# Altium footprint library WR-TBL_Pluggable Connector_5.08mm.PcbLib: 295 footprints (part 3 of 19)
Each footprint in its own frame and in the unit in brackets; x right, y up, seen from the top. Pads: shape width x height; smd on the part's side, far side on the other; paste and mask are expansions set on the pad; w line width, h text height; cw(c..) or ccw(c..) is an arc to the next point about the centre after c.
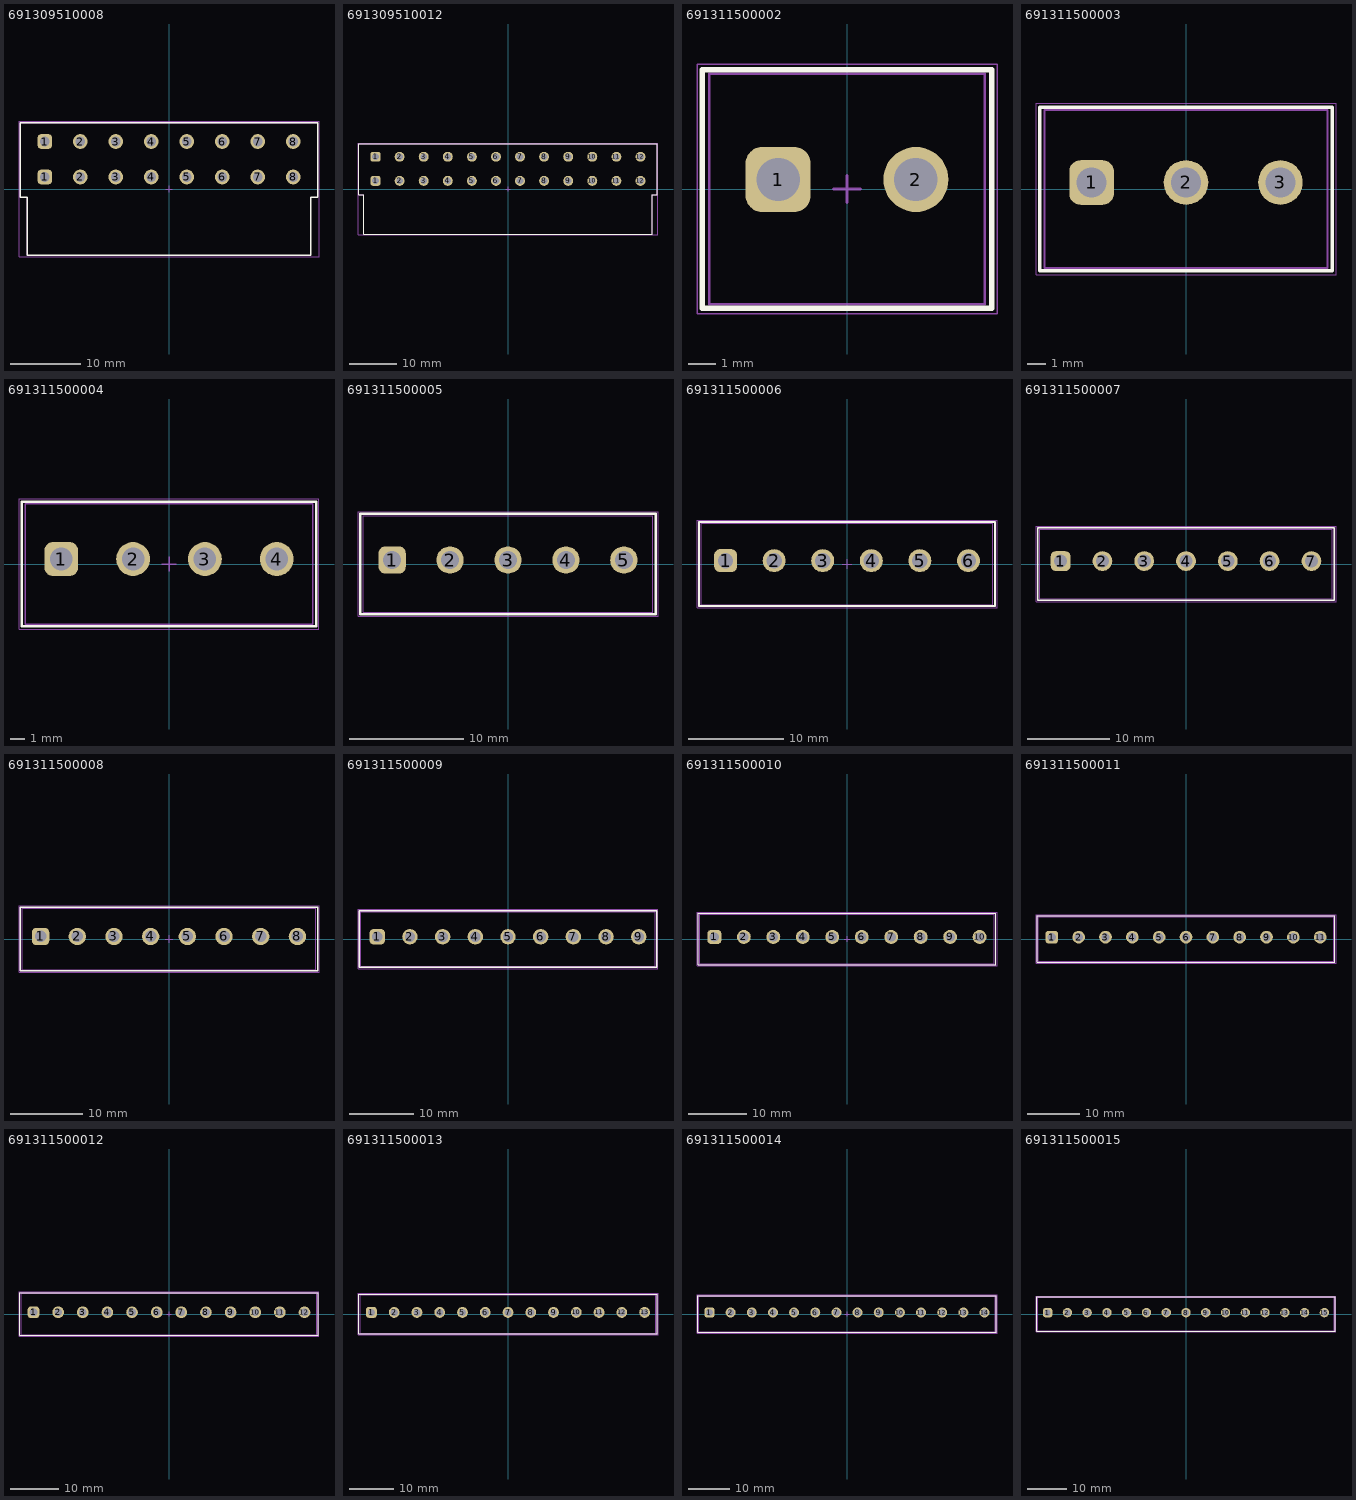
[diagram p2: the footprints below, top view; thin cyan lines are the x and y axes]

## 691309510008 [mm] "5.08 mm Reversed Gender Horizontal PCB Header - 08p"
height 8.6
pads (16):
  rrect50% 2.1x2.1 hole 1.4: 1(-17.78,1.72) 1(-17.78,6.8)
  round 2.1 hole 1.4: 2(-12.7,1.72) 2(-12.7,6.8) 3(-7.62,1.72) 3(-7.62,6.8) 4(-2.54,1.72) 4(-2.54,6.8) 5(2.54,1.72) 5(2.54,6.8) 6(7.62,1.72) 6(7.62,6.8) 7(12.7,1.72) 7(12.7,6.8) 8(17.78,1.72) 8(17.78,6.8)
Top Overlay:
  lines w0.2: -21.28,-1.2 -20.28,-1.2 -20.28,-9.5 20.28,-9.5 20.28,-1.2 21.28,-1.2 21.28,9.5 -21.28,9.5 -21.28,-1.2
Top Assembly:
  lines w0.1: -21.28,-1.2 -21.28,9.5 21.28,9.5 21.28,-1.2 20.28,-1.2 20.28,-9.5 -20.28,-9.5 -20.28,-1.2 -21.28,-1.2
Top Designator:
  text ".Designator" at -3.647,-0.357 h1
Top 3D Body:
  lines w0.1: -21.28,-1.2 -20.28,-1.2 -20.28,-9.5 20.28,-9.5 20.28,-1.2 21.28,-1.2 21.28,9.5 -21.28,9.5 -21.28,-1.2
Top Courtyard:
  lines w0.05: -21.48,-9.7 21.48,-9.7 21.48,9.7 -21.48,9.7 -21.48,-9.7
Top Component Center:
  lines w0.1: -0.5,0 0.5,0 ; 0,-0.5 0,0.5
3D body "691309510008.stp": height 10.94, standoff -3.55, extent -21.28,-9.5 21.28,9.5

## 691309510012 [mm] "5.08 mm Reversed Gender Horizontal PCB Header - 12p"
height 8.6
pads (24):
  rrect50% 2.1x2.1 hole 1.4: 1(-27.94,1.72) 1(-27.94,6.8)
  round 2.1 hole 1.4: 2(-22.86,1.72) 2(-22.86,6.8) 3(-17.78,1.72) 3(-17.78,6.8) 4(-12.7,1.72) 4(-12.7,6.8) 5(-7.62,1.72) 5(-7.62,6.8) 6(-2.54,1.72) 6(-2.54,6.8) 7(2.54,1.72) 7(2.54,6.8) 8(7.62,1.72) 8(7.62,6.8) 9(12.7,1.72) 9(12.7,6.8) 10(17.78,1.72) 10(17.78,6.8) 11(22.86,1.72) 11(22.86,6.8) 12(27.94,1.72) 12(27.94,6.8)
Top Overlay:
  lines w0.2: -31.44,-1.2 -31.44,9.5 31.44,9.5 31.44,-1.2 30.44,-1.2 30.44,-9.5 -30.44,-9.5 -30.44,-1.2 -31.44,-1.2
Top Assembly:
  lines w0.1: -31.44,-1.2 -30.44,-1.2 -30.44,-9.5 30.44,-9.5 30.44,-1.2 31.44,-1.2 31.44,9.5 -31.44,9.5 -31.44,-1.2
Top Designator:
  text ".Designator" at -3.647,-0.357 h1
Top 3D Body:
  lines w0.1: -31.44,-1.2 -31.44,9.5 31.44,9.5 31.44,-1.2 30.44,-1.2 30.44,-9.5 -30.44,-9.5 -30.44,-1.2 -31.44,-1.2
Top Courtyard:
  lines w0.05: -31.64,-9.7 -31.64,9.7 31.64,9.7 31.64,-9.7 -31.64,-9.7
Top Component Center:
  lines w0.1: -0.5,0 0.5,0 ; 0,-0.5 0,0.5
3D body "691309510012.stp": height 10.94, standoff -3.55, extent -31.44,-9.5 31.44,9.5

## 691311500002 [mm] "5,08mm - PCB Headers - Vertical - Opened ends -02p"
height 12
pads (2):
  rrect50% 2.4x2.4 hole 1.6: 1(-2.54,0.35)
  round 2.4 hole 1.6: 2(2.54,0.35)
Top Overlay:
  lines w0.2: -5.33,-4.4 -5.33,4.4 5.33,4.4 5.33,-4.4 -5.33,-4.4
Top Assembly:
  lines w0.1: -5.33,-4.4 5.33,-4.4 5.33,4.4 -5.33,4.4 -5.33,-4.4
Top Designator:
  text ".Designator" at -3.647,-0.357 h1
Top 3D Body:
  lines w0.1: -5.08,-4.25 -5.08,4.25 5.08,4.25 5.08,-4.25 -5.08,-4.25
Top Courtyard:
  lines w0.05: -5.53,-4.6 -5.53,4.6 5.53,4.6 5.53,-4.6 -5.53,-4.6
Top Component Center:
  lines w0.1: -0.5,0 0.5,0 ; 0,-0.5 0,0.5
3D body "691311500002.stp": height 12.05, standoff -3.95, extent -5.08,-4.25 5.08,4.25

## 691311500003 [mm] "5,08mm - PCB Headers - Vertical - Opened ends -03p"
height 12
pads (3):
  rrect50% 2.4x2.4 hole 1.6: 1(-5.08,0.35)
  round 2.4 hole 1.6: 2(0,0.35) 3(5.08,0.35)
Top Overlay:
  lines w0.2: -7.87,-4.4 -7.87,4.4 7.87,4.4 7.87,-4.4 -7.87,-4.4
Top Assembly:
  lines w0.1: -7.87,-4.4 7.87,-4.4 7.87,4.4 -7.87,4.4 -7.87,-4.4
Top Designator:
  text ".Designator" at -3.647,-0.357 h1
Top 3D Body:
  lines w0.1: -7.62,-4.25 -7.62,4.25 7.62,4.25 7.62,-4.25 -7.62,-4.25
Top Courtyard:
  lines w0.05: -8.07,-4.6 -8.07,4.6 8.07,4.6 8.07,-4.6 -8.07,-4.6
Top Component Center:
  lines w0.1: -0.5,0 0.5,0 ; 0,-0.5 0,0.5
3D body "691311500003.stp": height 12.05, standoff -3.95, extent -7.62,-4.25 7.62,4.25

## 691311500004 [mm] "5,08mm - PCB Headers - Vertical - Opened ends -04p"
height 12
pads (4):
  rrect50% 2.4x2.4 hole 1.6: 1(-7.62,0.35)
  round 2.4 hole 1.6: 2(-2.54,0.35) 3(2.54,0.35) 4(7.62,0.35)
Top Overlay:
  lines w0.2: -10.41,-4.4 10.41,-4.4 10.41,4.4 -10.41,4.4 -10.41,-4.4
Top Assembly:
  lines w0.1: -10.41,-4.4 -10.41,4.4 10.41,4.4 10.41,-4.4 -10.41,-4.4
Top Designator:
  text ".Designator" at -3.647,-0.357 h1
Top 3D Body:
  lines w0.1: -10.16,-4.25 10.16,-4.25 10.16,4.25 -10.16,4.25 -10.16,-4.25
Top Courtyard:
  lines w0.05: -10.61,-4.6 10.61,-4.6 10.61,4.6 -10.61,4.6 -10.61,-4.6
Top Component Center:
  lines w0.1: -0.5,0 0.5,0 ; 0,-0.5 0,0.5
3D body "691311500004.stp": height 12.05, standoff -3.95, extent -10.16,-4.25 10.16,4.25

## 691311500005 [mm] "5,08mm - PCB Headers - Vertical - Opened ends -05p"
height 12
pads (5):
  rrect50% 2.4x2.4 hole 1.6: 1(-10.16,0.35)
  round 2.4 hole 1.6: 2(-5.08,0.35) 3(0,0.35) 4(5.08,0.35) 5(10.16,0.35)
Top Overlay:
  lines w0.2: -12.95,-4.4 12.95,-4.4 12.95,4.4 -12.95,4.4 -12.95,-4.4
Top Assembly:
  lines w0.1: -12.95,-4.4 -12.95,4.4 12.95,4.4 12.95,-4.4 -12.95,-4.4
Top Designator:
  text ".Designator" at -3.647,-0.357 h1
Top 3D Body:
  lines w0.1: -12.7,-4.25 12.7,-4.25 12.7,4.25 -12.7,4.25 -12.7,-4.25
Top Courtyard:
  lines w0.05: -13.15,-4.6 13.15,-4.6 13.15,4.6 -13.15,4.6 -13.15,-4.6
Top Component Center:
  lines w0.1: -0.5,0 0.5,0 ; 0,-0.5 0,0.5
3D body "691311500005.stp": height 12.05, standoff -3.95, extent -12.7,-4.25 12.7,4.25

## 691311500006 [mm] "5,08mm - PCB Headers - Vertical - Opened ends -06p"
height 12
pads (6):
  rrect50% 2.4x2.4 hole 1.6: 1(-12.7,0.35)
  round 2.4 hole 1.6: 2(-7.62,0.35) 3(-2.54,0.35) 4(2.54,0.35) 5(7.62,0.35) 6(12.7,0.35)
Top Overlay:
  lines w0.2: -15.49,-4.4 15.49,-4.4 15.49,4.4 -15.49,4.4 -15.49,-4.4
Top Assembly:
  lines w0.1: -15.49,-4.4 -15.49,4.4 15.49,4.4 15.49,-4.4 -15.49,-4.4
Top Designator:
  text ".Designator" at -3.647,-0.357 h1
Top 3D Body:
  lines w0.1: -15.24,-4.25 15.24,-4.25 15.24,4.25 -15.24,4.25 -15.24,-4.25
Top Courtyard:
  lines w0.05: -15.69,-4.6 15.69,-4.6 15.69,4.6 -15.69,4.6 -15.69,-4.6
Top Component Center:
  lines w0.1: -0.5,0 0.5,0 ; 0,-0.5 0,0.5
3D body "691311500006.stp": height 12.05, standoff -3.95, extent -15.24,-4.25 15.24,4.25

## 691311500007 [mm] "5,08mm - PCB Headers - Vertical - Opened ends -07p"
height 12
pads (7):
  rrect50% 2.4x2.4 hole 1.6: 1(-15.24,0.35)
  round 2.4 hole 1.6: 2(-10.16,0.35) 3(-5.08,0.35) 4(0,0.35) 5(5.08,0.35) 6(10.16,0.35) 7(15.24,0.35)
Top Overlay:
  lines w0.2: -18.03,-4.4 18.03,-4.4 18.03,4.4 -18.03,4.4 -18.03,-4.4
Top Assembly:
  lines w0.1: -18.03,-4.4 -18.03,4.4 18.03,4.4 18.03,-4.4 -18.03,-4.4
Top Designator:
  text ".Designator" at -3.647,-0.357 h1
Top 3D Body:
  lines w0.1: -17.78,-4.25 17.78,-4.25 17.78,4.25 -17.78,4.25 -17.78,-4.25
Top Courtyard:
  lines w0.05: -18.23,-4.6 18.23,-4.6 18.23,4.6 -18.23,4.6 -18.23,-4.6
Top Component Center:
  lines w0.1: -0.5,0 0.5,0 ; 0,-0.5 0,0.5
3D body "691311500007.stp": height 12.05, standoff -3.95, extent -17.78,-4.25 17.78,4.25

## 691311500008 [mm] "5,08mm - PCB Headers - Vertical - Opened ends -08p"
height 12
pads (8):
  rrect50% 2.4x2.4 hole 1.6: 1(-17.78,0.35)
  round 2.4 hole 1.6: 2(-12.7,0.35) 3(-7.62,0.35) 4(-2.54,0.35) 5(2.54,0.35) 6(7.62,0.35) 7(12.7,0.35) 8(17.78,0.35)
Top Overlay:
  lines w0.2: -20.57,-4.4 20.57,-4.4 20.57,4.4 -20.57,4.4 -20.57,-4.4
Top Assembly:
  lines w0.1: -20.57,-4.4 -20.57,4.4 20.57,4.4 20.57,-4.4 -20.57,-4.4
Top Designator:
  text ".Designator" at -3.647,-0.357 h1
Top 3D Body:
  lines w0.1: -20.32,-4.25 20.32,-4.25 20.32,4.25 -20.32,4.25 -20.32,-4.25
Top Courtyard:
  lines w0.05: -20.77,-4.6 20.77,-4.6 20.77,4.6 -20.77,4.6 -20.77,-4.6
Top Component Center:
  lines w0.1: -0.5,0 0.5,0 ; 0,-0.5 0,0.5
3D body "691311500008.stp": height 12.05, standoff -3.95, extent -20.32,-4.25 20.32,4.25

## 691311500009 [mm] "5,08mm - PCB Headers - Vertical - Opened ends -09p"
height 12
pads (9):
  rrect50% 2.4x2.4 hole 1.6: 1(-20.32,0.35)
  round 2.4 hole 1.6: 2(-15.24,0.35) 3(-10.16,0.35) 4(-5.08,0.35) 5(0,0.35) 6(5.08,0.35) 7(10.16,0.35) 8(15.24,0.35) 9(20.32,0.35)
Top Overlay:
  lines w0.2: -23.11,-4.4 23.11,-4.4 23.11,4.4 -23.11,4.4 -23.11,-4.4
Top Assembly:
  lines w0.1: -23.11,-4.4 -23.11,4.4 23.11,4.4 23.11,-4.4 -23.11,-4.4
Top Designator:
  text ".Designator" at -3.647,-0.357 h1
Top 3D Body:
  lines w0.1: -22.86,-4.25 22.86,-4.25 22.86,4.25 -22.86,4.25 -22.86,-4.25
Top Courtyard:
  lines w0.05: -23.31,-4.6 23.31,-4.6 23.31,4.6 -23.31,4.6 -23.31,-4.6
Top Component Center:
  lines w0.1: -0.5,0 0.5,0 ; 0,-0.5 0,0.5
3D body "691311500009.stp": height 12.05, standoff -3.95, extent -22.86,-4.25 22.86,4.25

## 691311500010 [mm] "5,08mm - PCB Headers - Vertical - Opened ends -10p"
height 12
pads (10):
  rrect50% 2.4x2.4 hole 1.6: 1(-22.86,0.35)
  round 2.4 hole 1.6: 2(-17.78,0.35) 3(-12.7,0.35) 4(-7.62,0.35) 5(-2.54,0.35) 6(2.54,0.35) 7(7.62,0.35) 8(12.7,0.35) 9(17.78,0.35) 10(22.86,0.35)
Top Overlay:
  lines w0.2: -25.65,-4.4 25.65,-4.4 25.65,4.4 -25.65,4.4 -25.65,-4.4
Top Assembly:
  lines w0.1: -25.65,-4.4 -25.65,4.4 25.65,4.4 25.65,-4.4 -25.65,-4.4
Top Designator:
  text ".Designator" at -3.647,-0.357 h1
Top 3D Body:
  lines w0.1: -25.4,-4.25 25.4,-4.25 25.4,4.25 -25.4,4.25 -25.4,-4.25
Top Courtyard:
  lines w0.05: -25.85,-4.6 25.85,-4.6 25.85,4.6 -25.85,4.6 -25.85,-4.6
Top Component Center:
  lines w0.1: -0.5,0 0.5,0 ; 0,-0.5 0,0.5
3D body "691311500010.stp": height 12.05, standoff -3.95, extent -25.4,-4.25 25.4,4.25

## 691311500011 [mm] "5,08mm - PCB Headers - Vertical - Opened ends -11p"
height 12
pads (11):
  rrect50% 2.4x2.4 hole 1.6: 1(-25.4,0.35)
  round 2.4 hole 1.6: 2(-20.32,0.35) 3(-15.24,0.35) 4(-10.16,0.35) 5(-5.08,0.35) 6(0,0.35) 7(5.08,0.35) 8(10.16,0.35) 9(15.24,0.35) 10(20.32,0.35) 11(25.4,0.35)
Top Overlay:
  lines w0.2: -28.19,-4.4 28.19,-4.4 28.19,4.4 -28.19,4.4 -28.19,-4.4
Top Assembly:
  lines w0.1: -28.19,-4.4 -28.19,4.4 28.19,4.4 28.19,-4.4 -28.19,-4.4
Top Designator:
  text ".Designator" at -3.647,-0.357 h1
Top 3D Body:
  lines w0.1: -27.94,-4.25 27.94,-4.25 27.94,4.25 -27.94,4.25 -27.94,-4.25
Top Courtyard:
  lines w0.05: -28.39,-4.6 28.39,-4.6 28.39,4.6 -28.39,4.6 -28.39,-4.6
Top Component Center:
  lines w0.1: -0.5,0 0.5,0 ; 0,-0.5 0,0.5
3D body "691311500011.stp": height 12.05, standoff -3.95, extent -27.94,-4.25 27.94,4.25

## 691311500012 [mm] "5,08mm - PCB Headers - Vertical - Opened ends -12p"
height 12
pads (12):
  rrect50% 2.4x2.4 hole 1.6: 1(-27.94,0.35)
  round 2.4 hole 1.6: 2(-22.86,0.35) 3(-17.78,0.35) 4(-12.7,0.35) 5(-7.62,0.35) 6(-2.54,0.35) 7(2.54,0.35) 8(7.62,0.35) 9(12.7,0.35) 10(17.78,0.35) 11(22.86,0.35) 12(27.94,0.35)
Top Overlay:
  lines w0.2: -30.73,-4.4 30.73,-4.4 30.73,4.4 -30.73,4.4 -30.73,-4.4
Top Assembly:
  lines w0.1: -30.73,-4.4 -30.73,4.4 30.73,4.4 30.73,-4.4 -30.73,-4.4
Top Designator:
  text ".Designator" at -3.647,-0.357 h1
Top 3D Body:
  lines w0.1: -30.48,-4.25 30.48,-4.25 30.48,4.25 -30.48,4.25 -30.48,-4.25
Top Courtyard:
  lines w0.05: -30.93,-4.6 30.93,-4.6 30.93,4.6 -30.93,4.6 -30.93,-4.6
Top Component Center:
  lines w0.1: -0.5,0 0.5,0 ; 0,-0.5 0,0.5
3D body "691311500012.stp": height 12.05, standoff -3.95, extent -30.48,-4.25 30.48,4.25

## 691311500013 [mm] "5,08mm - PCB Headers - Vertical - Opened ends -13p"
height 12
pads (13):
  rrect50% 2.4x2.4 hole 1.6: 1(-30.48,0.35)
  round 2.4 hole 1.6: 2(-25.4,0.35) 3(-20.32,0.35) 4(-15.24,0.35) 5(-10.16,0.35) 6(-5.08,0.35) 7(0,0.35) 8(5.08,0.35) 9(10.16,0.35) 10(15.24,0.35) 11(20.32,0.35) 12(25.4,0.35) 13(30.48,0.35)
Top Overlay:
  lines w0.2: -33.27,-4.4 33.27,-4.4 33.27,4.4 -33.27,4.4 -33.27,-4.4
Top Assembly:
  lines w0.1: -33.27,-4.4 -33.27,4.4 33.27,4.4 33.27,-4.4 -33.27,-4.4
Top Designator:
  text ".Designator" at -3.647,-0.357 h1
Top 3D Body:
  lines w0.1: -33.02,-4.25 33.02,-4.25 33.02,4.25 -33.02,4.25 -33.02,-4.25
Top Courtyard:
  lines w0.05: -33.47,-4.6 33.47,-4.6 33.47,4.6 -33.47,4.6 -33.47,-4.6
Top Component Center:
  lines w0.1: -0.5,0 0.5,0 ; 0,-0.5 0,0.5
3D body "691311500013.stp": height 12.05, standoff -3.95, extent -33.02,-4.25 33.02,4.25

## 691311500014 [mm] "5,08mm - PCB Headers - Vertical - Opened ends -14p"
height 12
pads (14):
  rrect50% 2.4x2.4 hole 1.6: 1(-33.02,0.35)
  round 2.4 hole 1.6: 2(-27.94,0.35) 3(-22.86,0.35) 4(-17.78,0.35) 5(-12.7,0.35) 6(-7.62,0.35) 7(-2.54,0.35) 8(2.54,0.35) 9(7.62,0.35) 10(12.7,0.35) 11(17.78,0.35) 12(22.86,0.35) 13(27.94,0.35) 14(33.02,0.35)
Top Overlay:
  lines w0.2: -35.81,-4.4 35.81,-4.4 35.81,4.4 -35.81,4.4 -35.81,-4.4
Top Assembly:
  lines w0.1: -35.81,-4.4 -35.81,4.4 35.81,4.4 35.81,-4.4 -35.81,-4.4
Top Designator:
  text ".Designator" at -3.647,-0.357 h1
Top 3D Body:
  lines w0.1: -35.56,-4.25 35.56,-4.25 35.56,4.25 -35.56,4.25 -35.56,-4.25
Top Courtyard:
  lines w0.05: -36.01,-4.6 36.01,-4.6 36.01,4.6 -36.01,4.6 -36.01,-4.6
Top Component Center:
  lines w0.1: -0.5,0 0.5,0 ; 0,-0.5 0,0.5
3D body "691311500014.stp": height 12.05, standoff -3.95, extent -35.56,-4.25 35.56,4.25

## 691311500015 [mm] "5,08mm - PCB Headers - Vertical - Opened ends -15p"
height 12
pads (15):
  rrect50% 2.4x2.4 hole 1.6: 1(-35.56,0.35)
  round 2.4 hole 1.6: 2(-30.48,0.35) 3(-25.4,0.35) 4(-20.32,0.35) 5(-15.24,0.35) 6(-10.16,0.35) 7(-5.08,0.35) 8(0,0.35) 9(5.08,0.35) 10(10.16,0.35) 11(15.24,0.35) 12(20.32,0.35) 13(25.4,0.35) 14(30.48,0.35) 15(35.56,0.35)
Top Overlay:
  lines w0.2: -38.35,-4.4 38.35,-4.4 38.35,4.4 -38.35,4.4 -38.35,-4.4
Top Assembly:
  lines w0.1: -38.35,-4.4 -38.35,4.4 38.35,4.4 38.35,-4.4 -38.35,-4.4
Top Designator:
  text ".Designator" at -3.647,-0.357 h1
Top 3D Body:
  lines w0.1: -38.1,-4.25 38.1,-4.25 38.1,4.25 -38.1,4.25 -38.1,-4.25
Top Courtyard:
  lines w0.05: -38.55,-4.6 38.55,-4.6 38.55,4.6 -38.55,4.6 -38.55,-4.6
Top Component Center:
  lines w0.1: -0.5,0 0.5,0 ; 0,-0.5 0,0.5
3D body "691311500015.stp": height 12.05, standoff -3.95, extent -38.1,-4.25 38.1,4.25